# Altium footprint library LED_ANGULAR_2.PcbLib: 1 footprints
Each footprint in its own frame and in the unit in brackets; x right, y up, seen from the top. Pads: shape width x height; smd on the part's side, far side on the other; paste and mask are expansions set on the pad; w line width, h text height; cw(c..) or ccw(c..) is an arc to the next point about the centre after c.
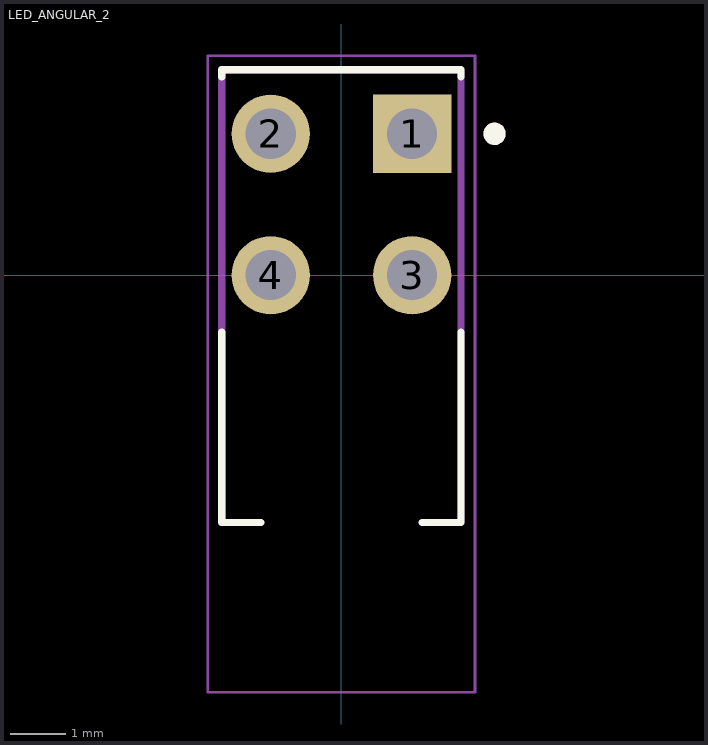
[diagram p0: the footprint, top view; thin cyan lines are the x and y axes]

## LED_ANGULAR_2 [mm]
height 9.9
pads (4):
  rect 1.408x1.408 / inner round 1.408 / far side rect 1.408x1.408 hole 0.9: 1(1.27,2.54)
  round 1.408 hole 0.9: 2(-1.27,2.54) 3(1.27,0) 4(-1.27,0)
Top Overlay:
  circle w0.2: c2.75,2.54 r0.1
  lines w0.127: -2.15,-1.024 -2.15,-4.44 -1.45,-4.44 ; -2.15,3.564 -2.15,3.69 2.15,3.69 2.15,3.564 ; 1.45,-4.44 2.15,-4.44 2.15,-1.024
Mechanical 13:
  circle w0.2: c2.75,2.54 r0.1
  lines w0.127: -1.45,-4.44 -2.15,-4.44 -2.15,3.69 2.15,3.69 2.15,-4.44 1.45,-4.44
Mechanical 15:
  lines w0.05: -2.4,-7.49 2.4,-7.49 2.4,3.94 -2.4,3.94 -2.4,-7.49
3D body "WP934EB_2ID.STEP": height 6.35, standoff -3.5, extent -2,-6.247 2,1.253
3D body "WP934EB_2ID.STEP": height 6.35, standoff -3.5, extent -2,-3.707 2,3.793
3D body "WP934EB_2ID.STEP": height 11.35, standoff 1.5, extent -2,-6.247 2,1.253
3D body "WP934EB_2ID.STEP": height 11.35, standoff 1.5, extent -2,-3.707 2,3.793